# Altium footprint library CAP_EZPV60506MTS.PcbLib: 1 footprints
Each footprint in its own frame and in the unit in brackets; x right, y up, seen from the top. Pads: shape width x height; smd on the part's side, far side on the other; paste and mask are expansions set on the pad; w line width, h text height; cw(c..) or ccw(c..) is an arc to the next point about the centre after c.
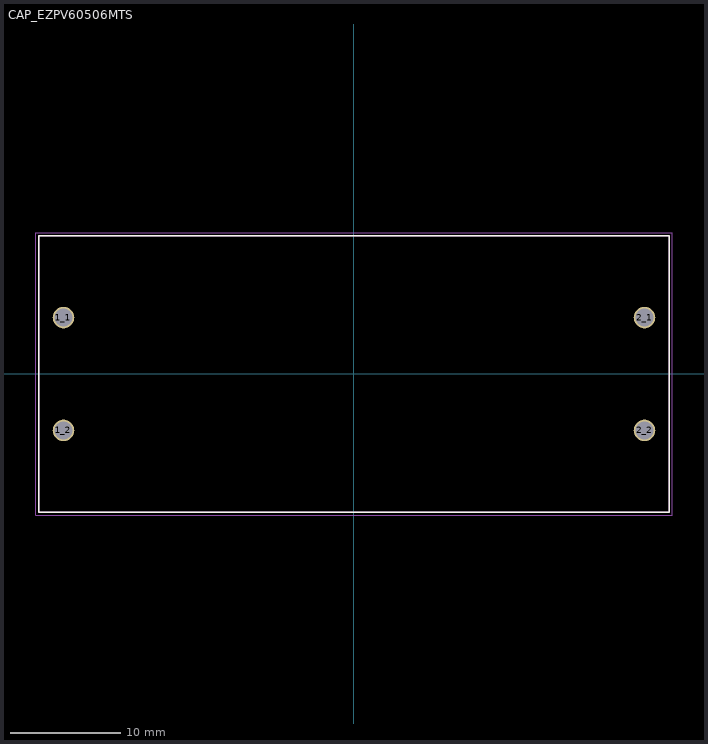
[diagram p0: the footprint, top view; thin cyan lines are the x and y axes]

## CAP_EZPV60506MTS [mm]
pads (4):
  round 1.95 hole 1.6: 1_1(-26.25,5.1) 1_2(-26.25,-5.1) 2_1(26.25,5.1) 2_2(26.25,-5.1)
Top Overlay:
  lines w0.127: -28.5,-12.5 28.5,-12.5 28.5,12.5 -28.5,12.5 -28.5,-12.5
Mechanical 13:
  lines w0.127: -28.5,-12.5 -28.5,12.5 28.5,12.5 28.5,-12.5 -28.5,-12.5
Mechanical 15:
  lines w0.05: -28.75,-12.75 -28.75,12.75 28.75,12.75 28.75,-12.75 -28.75,-12.75
3D body "step_temp.STEP": height 40, standoff -6, extent -28.5,-12.5 28.5,12.5